# Altium schematic symbol library RJE091884111A.SchLib: 1 symbol
Pins are listed as number, name and electrical type; pins without a type are passive.

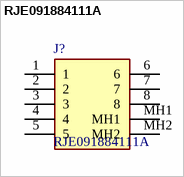
[diagram p0: symbol RJE091884111A]

## RJE091884111A
designator J?
Modular Jacks - Single port, 8P8C, R/A, shielded, Tab down, without LED; Manufacturer_Name: Amphenol Communications Solutions; Geometry.Height: 13.4mm; Mouser Part Number: *; Mouser Price/Stock: *; Manufacturer_Part_Number: RJE091884111A; Datasheet Link: https://cdn.amphenol-cs.com/media/wysiwyg/files/drawing/p-rje09-188-4111a.pdf
footprint RJE091884111A
pins: 1, 2, 3, 4, 5, 6, 7, 8, MH1, MH2